# Altium schematic symbol library UCP.SchLib: 378 symbols (part 14 of 14)
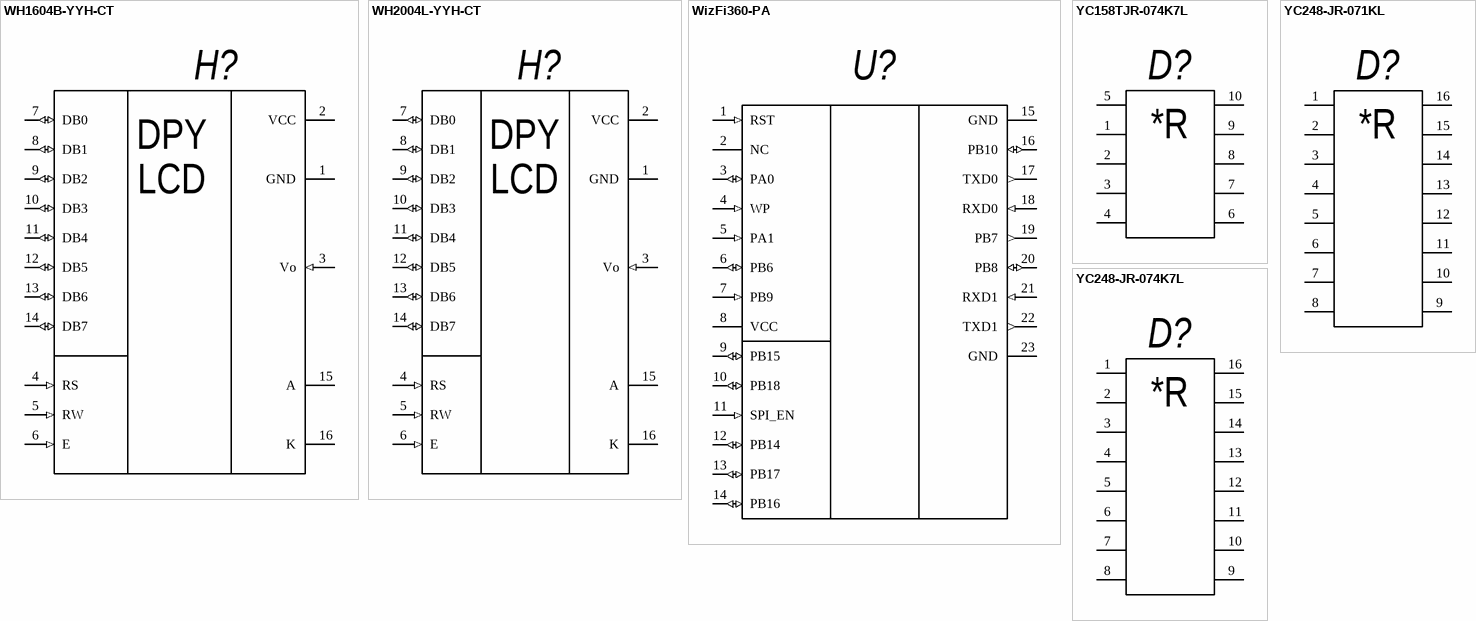
[diagram p37: symbols WH1604B-YYH-CT to YC248-JR-074K7L]

## YC248-JR-074K7L
designator D?  (value not drawn)
Резистивная матрица 8 отдельных резисторов 4,7 кОм ±5; Manufacturer 1: Yageo; Number of Terminals/Pins: 16; Resistance: 4.7kR; Number of Resistors: 8; Temperature Coefficient: 200ppm/°C; Tolerance: 5%; Voltage Rating: 50V; Circuit Type: Isolated; Power Per Element: 62.5mW; Type: Микросхема; Value: 4k7; Supplier 1: Farnell; Supplier Part Number 1: 1377057; Manufacturer Part Number 1: YC248-JR-074K7L; RoHS 1: Yes; Category: Resistor Arrays; Pricing 1: 10=0,12400, 100=0,05600, 500=0,04500, 1000=0,03400, 2500=0,03150, 5000=0,02900, 25000=0,02800 (EUR); Mount: SMT; Case/Package: 0616; Number of Pins: 16; Case Code (Metric): 1640; Case Code (Imperial): 0616; Min Operating Temperature: -55°C; Max Operating Temperature: 155°C; Number of Elements: 8; Package Quantity: 1; Packaging: Cut Tape; Termination: Convex; Number of Contacts: 16; Number of Circuits: 8; Series: YC248; Technology: THICK FILM; Resistance Tolerance: 5%; Length: 0.157inch; Width: 0.063inch; Height: 0.022inch; Terminal Pitch: 0.5mm; Depth: 1.6mm; Radiation Hardening: No; Military Standard: Not; Lead Free: Lead Free; RoHS Compliant: Yes; ComponentLink1URL: https://datasheet.ciiva.com/2689/pyu-r-marking-2-2689433.pdf?src-supplier=Digi-Key; ComponentLink1Description: https://datasheet.ciiva.com/2689/pyu-r-marking-2-2689433.pdf?src-supplier=Digi-Key; ComponentLink2URL: https://datasheet.ciiva.com/2689/pyu-r-marking-2-2689434.pdf?src-supplier=Digi-Key; ComponentLink2Description: https://datasheet.ciiva.com/2689/pyu-r-marking-2-2689434.pdf?src-supplier=Digi-Key; ComponentLink3URL: https://datasheet.ciiva.com/2689/pyu-r-marking-2-2689435.pdf?src-supplier=Digi-Key; ComponentLink3Description: https://datasheet.ciiva.com/2689/pyu-r-marking-2-2689435.pdf?src-supplier=Digi-Key; ComponentLink4URL: https://datasheet.ciiva.com/8018/443139-8018063.pdf?src-supplier=Element14; ComponentLink4Description: https://datasheet.ciiva.com/8018/443139-8018063.pdf?src-supplier=Element14; ComponentLink5URL: https://datasheet.ciiva.com/8311/pyu-yc248-51-rohs-l-2-8311734.pdf?src-supplier=Avnet; ComponentLink5Description: https://datasheet.ciiva.com/8311/pyu-yc248-51-rohs-l-2-8311734.pdf?src-supplier=Avnet; ComponentLink6URL: https://datasheet.ciiva.com/8018/443139-8018062.pdf?src-supplier=Element14; ComponentLink6Description: https://datasheet.ciiva.com/8018/443139-8018062.pdf?src-supplier=Element14
footprint RESCAXS16P50_400X160X55L40X30N (Resistor, Chip Array, 2 Side Convex, 0.50 mm pitch; 16 pin, 4.00 mm L X 1.60 mm W X 0.55 mm H body)
footprint RESCAXS16P50_400X160X55L40X30N_V2 (Resistor, Chip Array, 2 Side Convex, 0.50 mm pitch; 16 pin, 4.00 mm L X 1.60 mm W X 0.55 mm H body)
footprint RESCAXS16P50_400X160X55L40X30N_V3 (Resistor, Chip Array, 2 Side Convex, 0.50 mm pitch; 16 pin, 4.00 mm L X 1.60 mm W X 0.55 mm H body)
pins: 1 R1.1 "Назначение вывода", 2 R2.1 "Назначение вывода", 3 R3.1 "Назначение вывода", 4 R4.1 "Назначение вывода", 5 R5.1 "Общий вывод", 6 R6.1 "Назначение вывода", 7 R7.1 "Назначение вывода", 8 R8.1 "Назначение вывода", 9 R8.2 "Назначение вывода", 10 R7.2 "Общий вывод", 11 R6.2 "Общий вывод", 12 R5.2 "Общий вывод", 13 R4.2 "Общий вывод", 14 R3.2 "Общий вывод", 15 R2.2 "Общий вывод", 16 R1.2 "Назначение вывода"
text: *R